# EAGLE library part DE1A-12V (library DE1a-12V)
General Purpose Relay SPST-NO (1 Form A) 12VDC Coil Through Hole , 16.7mA , 720 Ohms , -40C ~ 70C Source: Datasheet <https://www.mouser.it/datasheet/2/315/mech_eng_de-1299471.pdf>
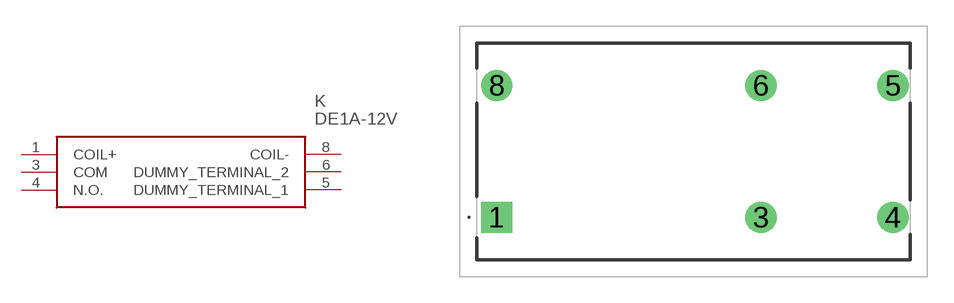
[diagram p0: symbol with the pads of DE1a12V; footprint DE1a12V]

Designator prefix K

## DE1A-12V (Description: General Purpose Relay SPST-NO (1 Form A) 12VDC Coil Through Hole , 16.7mA , 720 Ohms , -40C ~ 70C; Height: 12.8mm; Manufacturer_Name: Panasonic; Manufacturer_Part_Number: DE1a-12V; Mouser_Part_Number: 769-DE1A-12V)  [DE1a12V]
1  COIL+
3  COM
4  N.O.
5  DUMMY_TERMINAL_1
6  DUMMY_TERMINAL_2
8  COIL-

## Footprint DE1a12V (pad centres in mm)
DE1a-12V
drill 1.2 pad 1.8 square: 1 0,0
drill 1.2 pad 1.8: 3 15.24,0; 4 22.86,0; 5 22.86,7.62; 6 15.24,7.62; 8 0,7.62